# Altium footprint library Connector.PcbLib: 272 footprints (part 14 of 17)
Each footprint in its own frame and in the unit in brackets; x right, y up, seen from the top. Pads: shape width x height; smd on the part's side, far side on the other; paste and mask are expansions set on the pad; w line width, h text height; cw(c..) or ccw(c..) is an arc to the next point about the centre after c.
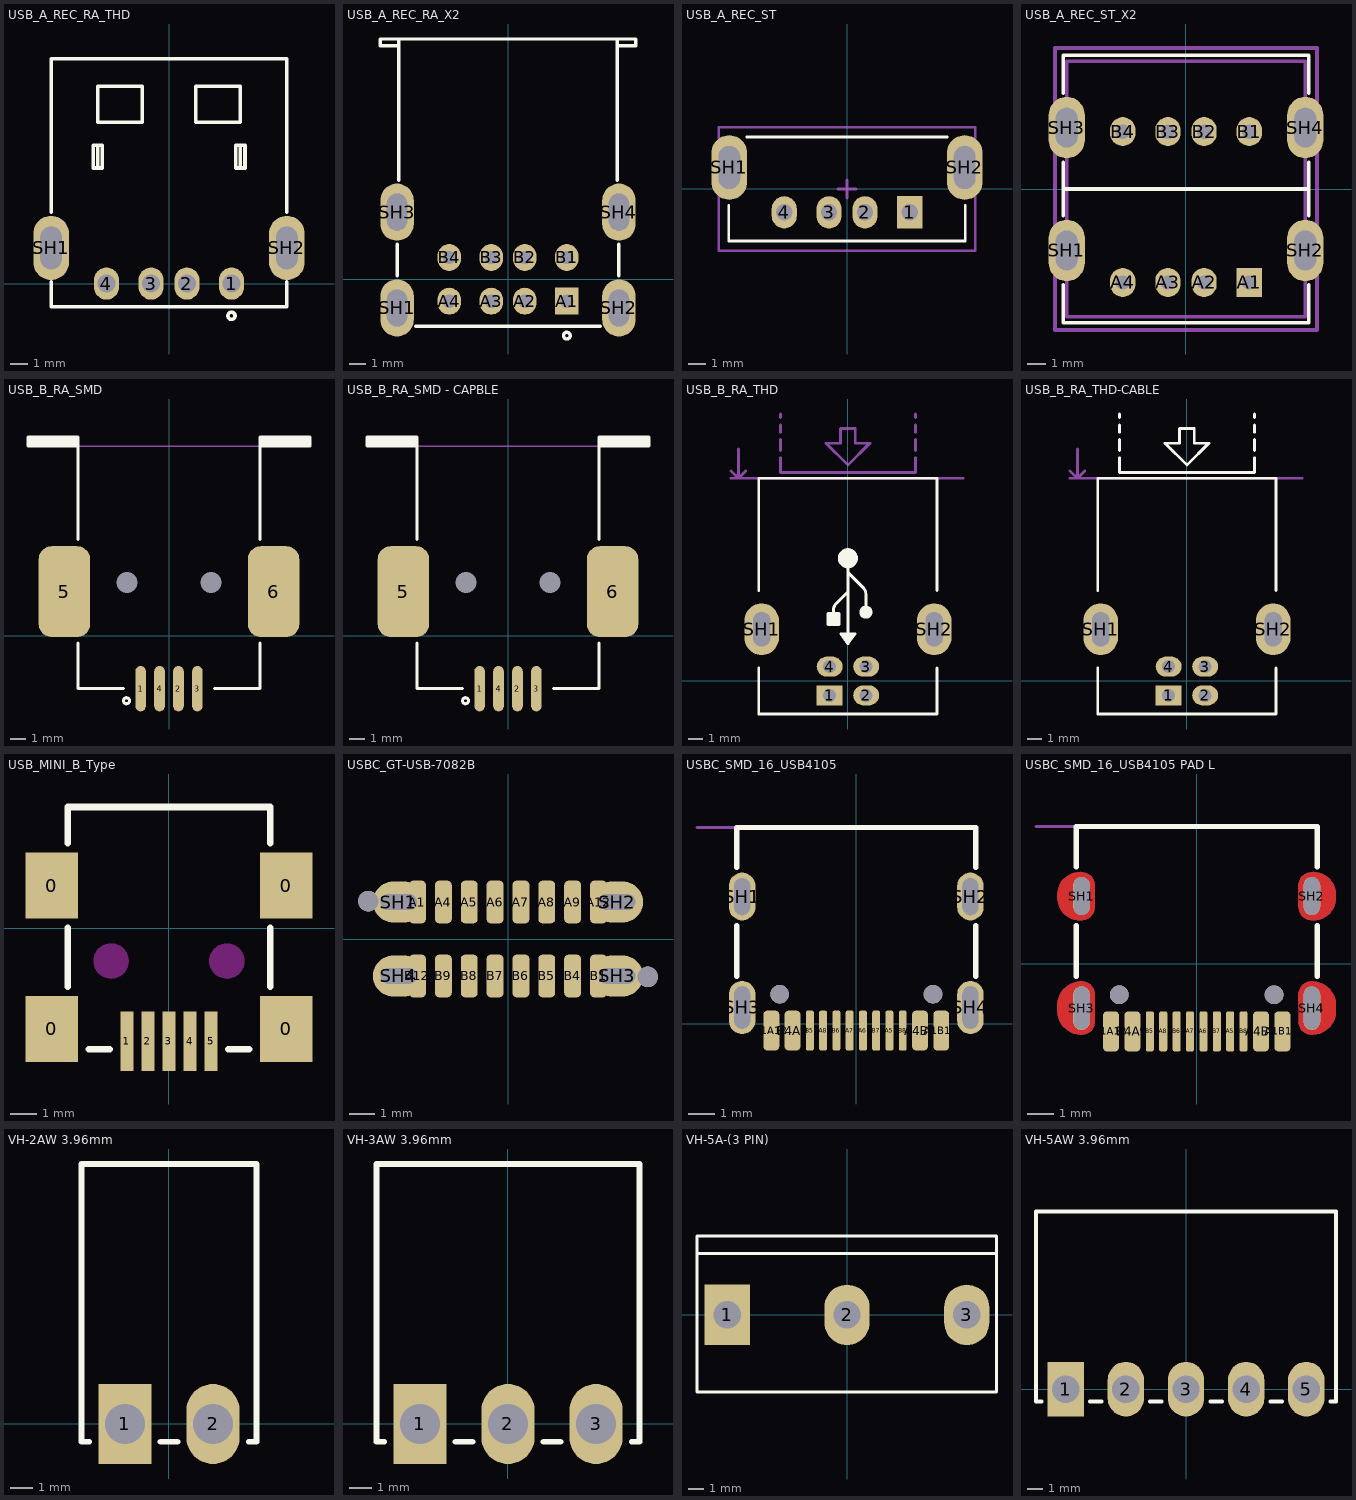
[diagram p13: the footprints below, top view; thin cyan lines are the x and y axes]

## USB_A_REC_RA_THD [mm] "CONN, USB A, Receptacle, RIGHT ANGLE, THD"
height 7
pads (6):
  oval 1.4x1.8 hole 1: 1(3.5,0) 2(1,0) 3(-1,0) 4(-3.5,0)
  oval 2x3.6 hole 1.2 slot 2.4 at 90 deg: SH1(-6.6,2) SH2(6.6,2)
Top Overlay:
  circle w0.2: c3.5,-1.8 r0.2
  lines w0.2: -6.6,0.1 -6.6,-1.3 6.6,-1.3 6.6,0.1 ; -6.6,4 -6.6,12.6 6.6,12.6 6.6,4 ; -3.995,6.475 -3.995,7.745 ; -3.995,6.475 -3.741,6.475 -3.741,7.745 -3.995,7.745 ; -3.995,6.475 -4.249,6.475 -4.249,7.745 -3.995,7.745 ; 4,6.475 4,7.745 ; 4,6.475 4.255,6.475 4.255,7.745 4,7.745 ; 4,6.475 3.746,6.475 3.746,7.745 4,7.745 ; -3.995,9.047 -1.495,9.047 -1.495,11.047 -3.995,11.047 -3.995,9.047 ; 1.5,9.047 4,9.047 4,11.047 1.5,11.047 1.5,9.047
Top Designator:
  text ".Designator" at -3.71,4.956 h1.52
3D body "User Library-USB-A-01.step": height 6.95, standoff -4.2, extent -7.9,-1.2 7.9,12.5

## USB_A_REC_RA_X2 [mm] "CONN, USB A, Right Angle, DUAL"
height 15.82
pads (12):
  rect 1.4x1.6 hole 0.8: A1(3.5,-1.3)
  oval 1.4x1.6 hole 0.8: A2(1,-1.3) A3(-1,-1.3) A4(-3.5,-1.3) B1(3.5,1.3) B2(1,1.3) B3(-1,1.3) B4(-3.5,1.3)
  oval 2x3.4 hole 1.2 slot 2.2 at 90 deg: SH1(-6.6,-1.7) SH2(6.6,-1.7) SH3(-6.6,4) SH4(6.6,4)
Top Overlay:
  circle w0.2: c3.5,-3.35 r0.2
  lines w0.2: -6.6,0.2 -6.6,2.1 ; -6.5,5.9 -6.5,14.3 ; -6.5,13.9 -7.6,13.9 -7.6,14.3 -6.5,14.3 ; -5.5,-2.8 5.5,-2.8 ; 6.5,5.9 6.5,14.3 ; 6.5,13.9 7.6,13.9 7.6,14.3 6.5,14.3 ; 6.6,0.2 6.6,2.1 ; -6.5,14.3 6.5,14.3
Mechanical 1:
  lines w0.1: -6.57,14.3 6.57,14.3
  text "PCB Edge" at 6.15,13.932 h0.2
Top Designator:
  text ".Designator" at -3.711,5.28 h1.52
3D body "14378.STEP": height 16.3, standoff -3.1, extent -7.851,-2.7 7.849,14.898

## USB_A_REC_ST [mm]
pads (6):
  rect 1.4x1.8 hole 0.9: 1(3.5,-1.3)
  oval 1.4x1.8 hole 0.9: 2(1,-1.3) 3(-1,-1.3) 4(-3.5,-1.3)
  oval 2x3.6 hole 1.2 slot 2.4 at 90 deg: SH1(-6.57,1.2) SH2(6.57,1.2)
Top Overlay:
  lines w0.15: -6.6,-0.9 -6.6,-2.9 6.6,-2.9 6.6,-0.9 ; -5.6,2.9 5.6,2.9
Top 3D Body:
  lines w0.15: -7.15,-3.45 -7.15,3.45 7.15,3.45 7.15,-3.45 -7.15,-3.45
Top Designator:
  text ".Designator" at -3.71,-0.354 h1.52
Mechanical 15:
  lines w0.15: -0.5,0 0.5,0 ; 0,-0.5 0,0.5
3D body "A-USB-A-TOP-C.stp": height 15.01, standoff -3.92, extent -7.9,-3.57 7.9,3.55

## USB_A_REC_ST_X2 [mm] "CONN, USB A, Receptacle, STRAIGHT, THD"
height 15
pads (12):
  rect 1.4x1.6 hole 0.8: A1(3.5,-5.173)
  oval 1.4x1.6 hole 0.8: A2(1,-5.173) A3(-1,-5.173) A4(-3.5,-5.173) B1(3.5,3.177) B2(1,3.177) B3(-1,3.177) B4(-3.5,3.177)
  oval 2x3.4 hole 1.2 slot 2.2 at 90 deg: SH1(-6.6,-3.4) SH2(6.6,-3.4) SH3(-6.6,3.4) SH4(6.6,3.4)
Top Overlay:
  lines w0.2: -6.8,-5.29 -6.8,-7.4 6.8,-7.4 6.8,-5.29 ; -6.8,-1.49 -6.8,1.49 ; -6.8,0 6.8,0 ; -6.8,5.29 -6.8,7.4 6.8,7.4 6.8,5.29 ; 6.8,-1.49 6.8,1.49
Top 3D Body:
  lines w0.2: -6.6,-7.075 6.6,-7.075 6.6,7.075 -6.6,7.075 -6.6,-7.075
Top Designator:
  text ".Designator" at -3.71,-0.344 h1.52
Mechanical 15:
  lines w0.2: -7.25,-7.8 -7.25,7.8 7.25,7.8 7.25,-7.8 -7.25,-7.8
3D body "614008235023.stp": height 16.91, standoff -3.59, extent -7.8,-7.825 7.8,7.825

## USB_B_RA_SMD [mm] "CONN, USB B, Receptacle, RIGHT ANGLE, SMD"
height 11
pads (8):
  oval 0.7x3 smd mask+0.075: 1(-1.875,-3.5) 2(0.625,-3.5) 3(1.875,-3.5) 4(-0.625,-3.5)
  rrect50% 3.4x6 smd: 5(-6.9,2.9) 6(6.9,2.9)
  round 1.1 hole 1.4 unplated: ""(-2.775,3.5) ""(2.775,3.5)
Top Overlay:
  circle w0.2: c-2.8,-4.3 r0.2
  region: -6.02,12.5 -6.02,13.1 -9.32,13.1 -9.32,12.5
  region: 9.32,12.5 9.32,13.1 6.02,13.1 6.02,12.5
  lines w0.2: -6.02,-0.5 -6.02,-3.5 -3,-3.5 ; -6.02,6.34 -6.02,12.5 ; 3,-3.5 6.02,-3.5 6.02,-0.5 ; 6.02,6.34 6.02,12.5 ; -6.02,12.5 -9.32,12.5 -9.32,13.1 -6.02,13.1 -6.02,12.5 ; 6.02,12.5 9.32,12.5 9.32,13.1 6.02,13.1 6.02,12.5
Mechanical 1:
  lines w0.1: -6.02,12.5 6.02,12.5
  text "PCB Edge" at 5.75,12.281 h0.25
Top Designator:
  text ".Designator" at -3.71,3.719 h1.52
3D body "14383.STEP": height 11, standoff -1.5, extent -8.097,-4.635 8.103,12.515

## USB_B_RA_SMD - CAPBLE [mm] "CONN, USB B, Receptacle, RIGHT ANGLE, SMD"
height 11
pads (8):
  oval 0.7x3 smd mask+0.075: 1(-1.875,-3.5) 2(0.625,-3.5) 3(1.875,-3.5) 4(-0.625,-3.5)
  rrect50% 3.4x6 smd: 5(-6.9,2.9) 6(6.9,2.9)
  round 1.1 hole 1.4 unplated: ""(-2.775,3.5) ""(2.775,3.5)
Top Overlay:
  circle w0.2: c-2.8,-4.3 r0.2
  region: 9.32,12.5 9.32,13.1 6.02,13.1 6.02,12.5
  region: -6.02,12.5 -6.02,13.1 -9.32,13.1 -9.32,12.5
  lines w0.2: -6.02,-0.5 -6.02,-3.5 -3,-3.5 ; -6.02,6.34 -6.02,12.5 ; 3,-3.5 6.02,-3.5 6.02,-0.5 ; 6.02,6.34 6.02,12.5 ; -6.02,12.5 -6.02,13.1 -9.32,13.1 -9.32,12.5 -6.02,12.5 ; 6.02,12.5 6.02,13.1 9.32,13.1 9.32,12.5 6.02,12.5
Mechanical 1:
  lines w0.1: -6.02,12.5 6.02,12.5
  text "PCB Edge" at 5.75,12.281 h0.25
Top Designator:
  text ".Designator" at -3.71,31.746 h1.52
3D body "14383.STEP": height 11, standoff -1.5, extent -8.097,-4.635 8.103,12.515
3D body "Samtec-DEFAULT.STEP": height 11.05, standoff 0.55, extent -5.702,3.305 5.498,69.255

## USB_B_RA_THD [mm] "CONN, USB B, Receptacle, RIGHT ANGLE, THD"
pads (6):
  rect 1.8x1.4 hole 0.9: 1(-1.27,-1)
  oval 1.8x1.4 hole 0.9: 2(1.27,-1) 3(1.27,1) 4(-1.27,1)
  oval 2.4x3.6 hole 1.2 slot 2.4 at 90 deg: SH1(-6,3.6) SH2(6,3.6)
Top Overlay:
  circle w0.508: c1.25,4.785 r0.2
  circle w0.889: c0,8.535 r0.254
  region: -1.375,3.935 -1.375,4.685 -0.625,4.685 -0.625,3.935
  region: 0,2.585 -0.5,3.285 0.5,3.285
  lines w0.2: -6.2,0.9 -6.2,-2.3 6.2,-2.3 6.2,0.9 ; -6.2,6.3 -6.2,14.1 6.2,14.1 6.2,6.3 ; -1,4.685 -1,4.935 cw(c-0.36,4.935) -0.812,5.388 -0.062,6.138 ; 0,3.285 0,8.035 ; 0.062,7.488 1.062,6.488 cw(c0.61,6.035) 1.25,6.035 1.25,4.785 ; -1.375,3.935 -0.625,3.935 -0.625,4.685 -1.375,4.685 -1.375,3.935 ; -0.5,3.285 0.5,3.285 0,2.585 -0.5,3.285
Mechanical 1:
  lines w0.2: -8.128,14.1 8.001,14.1 ; -8.128,14.608 -7.62,14.1 ; -7.62,16.132 -7.62,14.1 ; -7.112,14.608 -7.62,14.1
  text "Edge of Board" at -6.6,14.8 h1
Top Designator:
  text ".Designator" at -3.774,7.731 h1.52
Mechanical 15:
  lines w0.2: -4.699,15.524 -4.699,14.508 4.699,14.508 4.699,15.524 ; -4.699,16.032 -4.699,16.794 ; -4.699,17.302 -4.699,17.81 ; -4.699,18.318 -4.699,18.572 ; 4.699,16.032 4.699,16.794 ; 4.699,17.302 4.699,17.81 ; 4.699,18.318 4.699,18.572 ; -1.524,16.54 0,15.016 1.524,16.54 0.508,16.54 0.508,17.556 -0.508,17.556 -0.508,16.54 -1.524,16.54
3D body "User Library-Samtec - USB-B-S-X-W-TH.STEP": height 11.1, standoff -3.54, extent -7.453,-2.522 7.345,13.978

## USB_B_RA_THD-CABLE [mm] "CONN, USB B, Receptacle, RIGHT ANGLE, THD"
height 11.1
pads (6):
  rect 1.8x1.4 hole 0.9: 1(-1.27,-1)
  oval 1.8x1.4 hole 0.9: 2(1.27,-1) 3(1.27,1) 4(-1.27,1)
  oval 2.4x3.6 hole 1.2 slot 2.4 at 90 deg: SH1(-6,3.6) SH2(6,3.6)
Top Overlay:
  lines w0.2: -6.2,0.9 -6.2,-2.3 6.2,-2.3 6.2,0.9 ; -6.2,6.3 -6.2,14.1 6.2,14.1 6.2,6.3 ; -4.699,15.524 -4.699,14.508 4.699,14.508 4.699,15.524 ; -4.699,16.032 -4.699,16.794 ; -4.699,17.302 -4.699,17.81 ; -4.699,18.318 -4.699,18.572 ; 4.699,16.032 4.699,16.794 ; 4.699,17.302 4.699,17.81 ; 4.699,18.318 4.699,18.572 ; -1.524,16.54 0,15.016 1.524,16.54 0.508,16.54 0.508,17.556 -0.508,17.556 -0.508,16.54 -1.524,16.54
Mechanical 1:
  lines w0.2: -8.128,14.1 8.001,14.1 ; -8.128,14.608 -7.62,14.1 ; -7.62,16.132 -7.62,14.1 ; -7.112,14.608 -7.62,14.1
  text "Edge of Board" at -6.6,14.8 h1
Top Designator:
  text ".Designator" at -3.774,32.661 h1.52
3D body "User Library-Samtec - USB-B-S-X-W-TH.STEP": height 11.1, standoff -3.54, extent -7.453,-2.522 7.345,13.978
3D body "Samtec-DEFAULT.STEP": height 11.05, standoff 0.55, extent -5.575,2.582 5.625,68.532

## USB_MINI_B_Type [mm] "5075BMR-05-SM"
pads (9):
  rect 2x2.5 smd: 0(-4.45,-3.83) 0(-4.45,1.62) 0(4.45,-3.83) 0(4.45,1.62)
  rect 0.5x2.25 smd: 1(-1.6,-4.3) 2(-0.8,-4.3) 3(0,-4.3) 4(0.8,-4.3) 5(1.6,-4.3)
Top Overlay:
  lines w0.254: -3.85,-2.23 -3.85,0.02 ; -3.85,3.22 -3.85,4.6 3.85,4.6 3.85,3.22 ; -3.05,-4.6 -2.25,-4.6 ; 2.25,-4.6 3.05,-4.6 ; 3.85,-2.23 3.85,0.02
Keep-Out Layer:
  board cut-out: 2.2,-0.65 2.319,-0.65 2.54,-0.741 2.709,-0.91 2.8,-1.131 2.8,-1.25 2.8,-1.369 2.709,-1.59 2.54,-1.759 2.319,-1.85 2.2,-1.85 2.081,-1.85 1.86,-1.759 1.691,-1.59 1.6,-1.369 1.6,-1.25 1.6,-1.131 1.691,-0.91 1.86,-0.741 2.081,-0.65
  board cut-out: -2.2,-0.65 -2.319,-0.65 -2.54,-0.741 -2.709,-0.91 -2.8,-1.131 -2.8,-1.25 -2.8,-1.369 -2.709,-1.59 -2.54,-1.759 -2.319,-1.85 -2.2,-1.85 -2.081,-1.85 -1.86,-1.759 -1.691,-1.59 -1.6,-1.369 -1.6,-1.25 -1.6,-1.131 -1.691,-0.91 -1.86,-0.741 -2.081,-0.65
Keep-Out Layer:
  circle w0.15: c2.2,-1.25 r0.6
  circle w0.15: c-2.2,-1.25 r0.6
Top Designator:
  text ".Designator" at -3.71,-0.744 h1.52
Mechanical 15:
  text ".Designator" at 0.338,-3.63 h1.5
3D body "USB_mini_B.step": height 4, standoff -0.95, extent -5.35,-4.55 5.35,4.65

## USBC_GT-USB-7082B [mm] "5A USB 2.0 1 Brick nogging 16P Female -40?~+85? Gold High Conductivity Copper Type-C SMD USB Connectors ROHS"
height 3.31
pads (22):
  rrect50% 0.65x1.65 smd mask+0.075: A1(-3.5,1.43) A4(-2.5,1.43) A5(-1.5,1.43) A6(-0.5,1.43) A7(0.5,1.43) A8(1.5,1.43) A9(2.5,1.43) A12(3.5,1.43) B1(3.5,-1.43) B4(2.5,-1.43) B5(1.5,-1.43) B6(0.5,-1.43) B7(-0.5,-1.43) B8(-1.5,-1.43) B9(-2.5,-1.43) B12(-3.5,-1.43)
  oval 2x1.6 hole 0.6 slot 1.4 at 0 deg: SH1(-4.225,1.43) SH2(4.225,1.43) SH3(4.225,-1.43) SH4(-4.225,-1.43)
  round 0.8 hole 0.8 unplated: ""(-5.4,1.465) ""(5.4,-1.465)
Top 3D Body:
  lines w0.15: -5.4,1.465 -5.4,1.465
Top Designator:
  text ".Designator" at -3.71,-0.344 h1.52
3D body "typeC.STEP": height 9.36, standoff -2.14, extent -6,-2.5 6,2.5

## USBC_SMD_16_USB4105 [mm] "CONN, USB, Type C, USB4105, popular*"
height 3.31
pads (18):
  rrect50% 0.6x1.5 smd mask+0.075: A1B12(3.2,-0.25) A4B9(2.4,-0.25) B1A12(-3.2,-0.25) B4A9(-2.4,-0.25)
  rrect50% 0.3x1.5 smd mask+0.075: A5(1.25,-0.25) A6(0.25,-0.25) A7(-0.25,-0.25) A8(-1.25,-0.25) B5(-1.75,-0.25) B6(-0.75,-0.25) B7(0.75,-0.25) B8(1.75,-0.25)
  oval 1x1.8 hole 0.6 slot 1.4 at 90 deg: SH1(-4.3,4.8) SH2(4.3,4.8)
  oval 1x2 hole 0.6 slot 1.6 at 90 deg: SH3(-4.3,0.62) SH4(4.3,0.62)
  round 0.7 hole 0.7 unplated: ""(-2.89,1.12) ""(2.89,1.12)
Top Overlay:
  lines w0.2: -4.5,1.8 -4.5,3.7 ; -4.5,5.9 -4.5,7.4 4.5,7.4 4.5,5.9 ; 4.5,1.8 4.5,3.7
Top Designator:
  text ".Designator" at -4.335,3.493 h1.52
Mechanical 13:
  lines w0.1: -6,7.4 -4,7.4
Mechanical 15:
  text "PCB EDGE" at -6,7.8 h0.8
3D body "USB4105-15-A.stp": height 3.26, standoff -0.9, extent -4.79,-0.3 4.79,7.408

## USBC_SMD_16_USB4105 PAD L [mm] "CONN, USB, Type C, USB4105, popular*"
height 3.31
pads (18):
  rrect50% 0.6x1.5 smd mask+0.075: A1B12(3.2,-2.525) A4B9(2.4,-2.525) B1A12(-3.2,-2.525) B4A9(-2.4,-2.525)
  rrect50% 0.3x1.5 smd mask+0.075: A5(1.25,-2.525) A6(0.25,-2.525) A7(-0.25,-2.525) A8(-1.25,-2.525) B5(-1.75,-2.525) B6(-0.75,-2.525) B7(0.75,-2.525) B8(1.75,-2.525)
  oval 0.625x1.425 hole 0.6 slot 1.4 at 90 deg: SH1(-4.3,2.525) SH2(4.3,2.525)
  oval 0.625x1.625 hole 0.6 slot 1.6 at 90 deg: SH3(-4.3,-1.655) SH4(4.3,-1.655)
  round 0.7 hole 0.7 unplated: ""(-2.89,-1.155) ""(2.89,-1.155)
Top Layer:
  region: 3.8,-2.155 3.8,-2.204 3.819,-2.301 3.857,-2.392 3.912,-2.474 3.981,-2.543 4.063,-2.598 4.154,-2.636 4.251,-2.655 4.3,-2.655 4.359,-2.655 4.476,-2.64 4.59,-2.609 4.699,-2.564 4.801,-2.505 4.895,-2.433 4.978,-2.35 5.05,-2.256 5.109,-2.154 5.154,-2.045 5.185,-1.931 5.2,-1.814 5.2,-1.755 5.2,-1.555 5.2,-1.496 5.185,-1.379 5.154,-1.265 5.109,-1.156 5.05,-1.054 4.978,-0.96 4.895,-0.877 4.801,-0.805 4.699,-0.746 4.59,-0.701 4.476,-0.67 4.359,-0.655 4.3,-0.655 4.251,-0.655 4.154,-0.674 4.063,-0.712 3.981,-0.767 3.912,-0.836 3.857,-0.918 3.819,-1.009 3.8,-1.106 3.8,-1.155
  region: 4.3,1.625 4.251,1.625 4.154,1.644 4.063,1.682 3.981,1.737 3.912,1.806 3.857,1.888 3.819,1.979 3.8,2.076 3.8,2.125 3.8,2.925 3.8,2.974 3.819,3.071 3.857,3.162 3.912,3.244 3.981,3.313 4.063,3.368 4.154,3.406 4.251,3.425 4.3,3.425 4.356,3.428 4.467,3.42 4.576,3.398 4.682,3.361 4.782,3.311 4.874,3.248 4.957,3.174 5.03,3.09 5.092,2.997 5.14,2.896 5.176,2.79 5.197,2.681 5.2,2.625 5.2,2.425 5.197,2.369 5.176,2.26 5.141,2.154 5.092,2.053 5.03,1.96 4.957,1.876 4.874,1.802 4.782,1.739 4.682,1.689 4.576,1.652 4.467,1.63 4.356,1.622
  region: -4.3,1.625 -4.356,1.622 -4.467,1.63 -4.576,1.652 -4.682,1.689 -4.782,1.739 -4.874,1.802 -4.957,1.876 -5.03,1.96 -5.092,2.053 -5.141,2.154 -5.176,2.26 -5.197,2.369 -5.2,2.425 -5.2,2.625 -5.197,2.681 -5.176,2.791 -5.141,2.897 -5.092,2.997 -5.031,3.09 -4.958,3.175 -4.875,3.249 -4.782,3.312 -4.682,3.362 -4.577,3.398 -4.467,3.421 -4.356,3.428 -4.3,3.425 -4.251,3.425 -4.154,3.406 -4.063,3.368 -3.981,3.313 -3.912,3.244 -3.857,3.162 -3.819,3.071 -3.8,2.974 -3.8,2.925 -3.8,2.125 -3.8,2.076 -3.819,1.979 -3.857,1.888 -3.912,1.806 -3.981,1.737 -4.063,1.682 -4.154,1.644 -4.251,1.625
  region: -4.3,-2.655 -4.359,-2.655 -4.476,-2.64 -4.59,-2.609 -4.699,-2.564 -4.801,-2.505 -4.895,-2.433 -4.978,-2.35 -5.05,-2.256 -5.109,-2.154 -5.154,-2.045 -5.185,-1.931 -5.2,-1.814 -5.2,-1.755 -5.2,-1.555 -5.2,-1.496 -5.185,-1.379 -5.154,-1.265 -5.109,-1.156 -5.05,-1.054 -4.978,-0.96 -4.895,-0.877 -4.801,-0.805 -4.699,-0.746 -4.59,-0.701 -4.476,-0.67 -4.359,-0.655 -4.3,-0.655 -4.251,-0.655 -4.154,-0.674 -4.063,-0.712 -3.981,-0.767 -3.912,-0.836 -3.857,-0.918 -3.819,-1.009 -3.8,-1.106 -3.8,-1.155 -3.8,-2.155 -3.8,-2.204 -3.819,-2.301 -3.857,-2.392 -3.912,-2.474 -3.981,-2.543 -4.063,-2.598 -4.154,-2.636 -4.251,-2.655
Bottom Layer:
  region: 3.8,-2.155 3.8,-2.204 3.819,-2.301 3.857,-2.392 3.912,-2.474 3.981,-2.543 4.063,-2.598 4.154,-2.636 4.251,-2.655 4.3,-2.655 4.359,-2.655 4.476,-2.64 4.59,-2.609 4.699,-2.564 4.801,-2.505 4.895,-2.433 4.978,-2.35 5.05,-2.256 5.109,-2.154 5.154,-2.045 5.185,-1.931 5.2,-1.814 5.2,-1.755 5.2,-1.555 5.2,-1.496 5.185,-1.379 5.154,-1.265 5.109,-1.156 5.05,-1.054 4.978,-0.96 4.895,-0.877 4.801,-0.805 4.699,-0.746 4.59,-0.701 4.476,-0.67 4.359,-0.655 4.3,-0.655 4.251,-0.655 4.154,-0.674 4.063,-0.712 3.981,-0.767 3.912,-0.836 3.857,-0.918 3.819,-1.009 3.8,-1.106 3.8,-1.155
  region: 4.3,1.625 4.251,1.625 4.154,1.644 4.063,1.682 3.981,1.737 3.912,1.806 3.857,1.888 3.819,1.979 3.8,2.076 3.8,2.125 3.8,2.925 3.8,2.974 3.819,3.071 3.857,3.162 3.912,3.244 3.981,3.313 4.063,3.368 4.154,3.406 4.251,3.425 4.3,3.425 4.356,3.428 4.467,3.42 4.576,3.398 4.682,3.361 4.782,3.311 4.874,3.248 4.957,3.174 5.03,3.09 5.092,2.997 5.14,2.896 5.176,2.79 5.197,2.681 5.2,2.625 5.2,2.425 5.197,2.369 5.176,2.26 5.141,2.154 5.092,2.053 5.03,1.96 4.957,1.876 4.874,1.802 4.782,1.739 4.682,1.689 4.576,1.652 4.467,1.63 4.356,1.622
  region: -4.3,1.625 -4.356,1.622 -4.467,1.63 -4.576,1.652 -4.682,1.689 -4.782,1.739 -4.874,1.802 -4.957,1.876 -5.03,1.96 -5.092,2.053 -5.141,2.154 -5.176,2.26 -5.197,2.369 -5.2,2.425 -5.2,2.625 -5.197,2.681 -5.176,2.791 -5.141,2.897 -5.092,2.997 -5.031,3.09 -4.958,3.175 -4.875,3.249 -4.782,3.312 -4.682,3.362 -4.577,3.398 -4.467,3.421 -4.356,3.428 -4.3,3.425 -4.251,3.425 -4.154,3.406 -4.063,3.368 -3.981,3.313 -3.912,3.244 -3.857,3.162 -3.819,3.071 -3.8,2.974 -3.8,2.925 -3.8,2.125 -3.8,2.076 -3.819,1.979 -3.857,1.888 -3.912,1.806 -3.981,1.737 -4.063,1.682 -4.154,1.644 -4.251,1.625
  region: -4.3,-2.655 -4.359,-2.655 -4.476,-2.64 -4.59,-2.609 -4.699,-2.564 -4.801,-2.505 -4.895,-2.433 -4.978,-2.35 -5.05,-2.256 -5.109,-2.154 -5.154,-2.045 -5.185,-1.931 -5.2,-1.814 -5.2,-1.755 -5.2,-1.555 -5.2,-1.496 -5.185,-1.379 -5.154,-1.265 -5.109,-1.156 -5.05,-1.054 -4.978,-0.96 -4.895,-0.877 -4.801,-0.805 -4.699,-0.746 -4.59,-0.701 -4.476,-0.67 -4.359,-0.655 -4.3,-0.655 -4.251,-0.655 -4.154,-0.674 -4.063,-0.712 -3.981,-0.767 -3.912,-0.836 -3.857,-0.918 -3.819,-1.009 -3.8,-1.106 -3.8,-1.155 -3.8,-2.155 -3.8,-2.204 -3.819,-2.301 -3.857,-2.392 -3.912,-2.474 -3.981,-2.543 -4.063,-2.598 -4.154,-2.636 -4.251,-2.655
Top Overlay:
  lines w0.2: -4.5,-0.475 -4.5,1.425 ; -4.5,3.625 -4.5,5.125 4.5,5.125 4.5,3.625 ; 4.5,-0.475 4.5,1.425
Top Designator:
  text ".Designator" at -4.185,1.218 h1.52
Mechanical 13:
  lines w0.1: -6,5.125 -4,5.125
Mechanical 15:
  text "PCB EDGE" at -6,5.525 h0.8
3D body "USB4105-15-A.stp": height 3.26, standoff -0.9, extent -4.79,-2.575 4.79,5.133

## VH-2AW 3.96mm [mm] "3.96mm"
pads (2):
  rect 2.4x3.6 hole 1.8: 1(-1.98,0)
  oval 2.4x3.6 hole 1.8: 2(1.98,0)
Top Overlay:
  lines w0.254: -3.58,-0.805 -3.935,-0.805 -3.935,11.695 3.935,11.695 3.935,-0.805 3.58,-0.805 ; -0.38,-0.805 0.38,-0.805
Top Designator:
  text ".Designator" at -3.71,4.616 h1.52
3D body "VH-2AW-3.96.stp": height 8.49, standoff -2.95, extent -3.96,-0.64 3.96,10.25

## VH-3AW 3.96mm [mm] "3.96mm"
pads (3):
  rect 2.4x3.6 hole 1.8: 1(-3.96,0)
  oval 2.4x3.6 hole 1.8: 2(0,0) 3(3.96,0)
Top Overlay:
  lines w0.254: -5.56,-0.805 -5.915,-0.805 -5.915,11.695 5.915,11.695 5.915,-0.805 5.56,-0.805 ; -2.36,-0.805 -1.6,-0.805 ; 1.6,-0.805 2.36,-0.805
Top Designator:
  text ".Designator" at -3.71,4.616 h1.52
3D body "VH-2AW-3.96.stp": height 8.49, standoff -2.95, extent -1.98,-0.64 5.94,10.25
3D body "VH-2AW-3.96.stp": height 8.49, standoff -2.95, extent -5.94,-0.64 1.98,10.25

## VH-5A-(3 PIN) [mm]
height 0.001
pads (3):
  rect 3x4 hole 1.8: 1(-7.92,0)
  oval 3x4 hole 1.8: 2(0,0) 3(7.92,0)
Top Overlay:
  lines w0.2: -9.92,4.064 9.9,4.064 ; -9.92,-5.1 9.9,-5.1 9.9,5.207 -9.92,5.207 -9.92,-5.1
Top Designator:
  text ".Designator" at -3.71,-0.29 h1.52
3D body "JST - VH - Thru (V) - 5Pin - 3.96mm.stp": height 10.38, standoff -3.95, extent -10.218,-4.648 10.218,4.039

## VH-5AW 3.96mm [mm] "3.96mm"
pads (5):
  rect 2.4x3.6 hole 1.8: 1(-7.92,0)
  oval 2.4x3.6 hole 1.8: 2(-3.96,0) 3(0,0) 4(3.96,0) 5(7.92,0)
Top Overlay:
  lines w0.254: -9.52,-0.805 -9.875,-0.805 -9.875,11.695 9.875,11.695 9.875,-0.805 9.52,-0.805 ; -6.32,-0.805 -5.56,-0.805 ; -2.36,-0.805 -1.6,-0.805 ; 1.6,-0.805 2.36,-0.805 ; 5.56,-0.805 6.32,-0.805
Top Designator:
  text ".Designator" at -3.71,4.461 h1.52
3D body "VH-2AW-3.96.stp": height 8.49, standoff -2.95, extent 1.98,-0.64 9.9,10.25
3D body "VH-2AW-3.96.stp": height 8.49, standoff -2.95, extent -1.98,-0.64 5.94,10.25
3D body "VH-2AW-3.96.stp": height 8.49, standoff -2.95, extent -5.94,-0.64 1.98,10.25
3D body "VH-2AW-3.96.stp": height 8.49, standoff -2.95, extent -9.9,-0.64 -1.98,10.25